# Altium footprint library AO4407A_C2841482.PcbLib: 1 footprints
Each footprint in its own frame and in the unit in brackets; x right, y up, seen from the top. Pads: shape width x height; smd on the part's side, far side on the other; paste and mask are expansions set on the pad; w line width, h text height; cw(c..) or ccw(c..) is an arc to the next point about the centre after c.
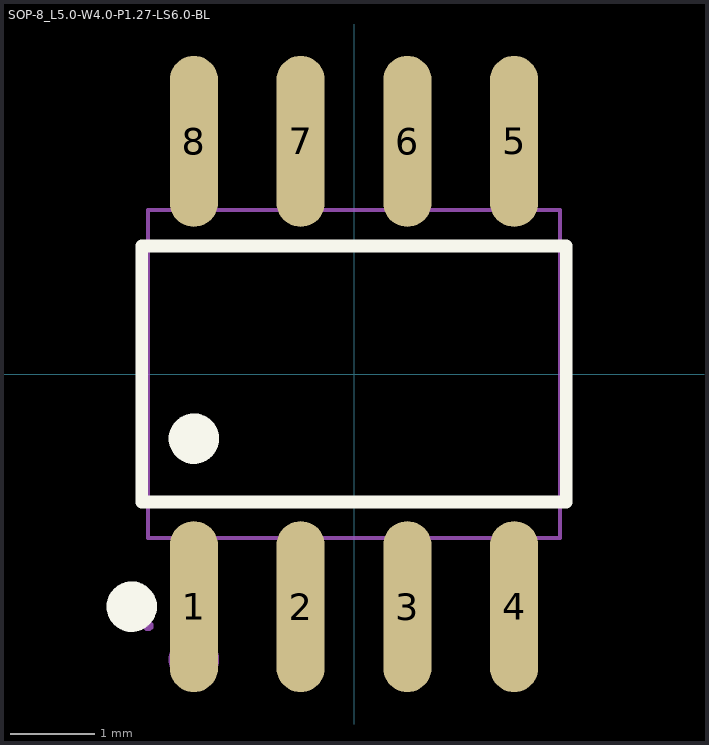
[diagram p0: the footprint, top view; thin cyan lines are the x and y axes]

## SOP-8_L5.0-W4.0-P1.27-LS6.0-BL [mil]
pads (8):
  oval 22.6x80.14 smd: 1(-75,-108.97) 2(-25,-108.97) 3(25,-108.97) 4(75,-108.97) 5(75,108.97) 6(25,108.97) 7(-25,108.97) 8(-75,108.97)
Top Overlay:
  circle w11.81: c-104.11,-108.97 r5.91
  circle w11.81: c-75,-30.28 r5.91
  lines w6: -99.46,-59.9 99.46,-59.9 99.46,59.9 -99.46,59.9 -99.46,-59.9
Mechanical 2:
  circle w11.81: c-75,-133.76 r5.91
Mechanical 6:
  lines w2: -96.46,-76.77 96.46,-76.77 96.46,76.77 -96.46,76.77 -96.46,-76.77
Mechanical 7:
  region: 66.93,85.53 66.93,76.38 83.07,76.38 83.07,85.53
  region: 16.93,85.53 16.93,76.38 33.07,76.38 33.07,85.53
  region: -33.07,85.53 -33.07,76.38 -16.93,76.38 -16.93,85.53
  region: -83.07,85.53 -83.07,76.38 -66.93,76.38 -66.93,85.53
  region: 66.93,-85.53 66.93,-76.38 83.07,-76.38 83.07,-85.53
  region: 16.93,-85.53 16.93,-76.38 33.07,-76.38 33.07,-85.53
  region: -33.07,-85.53 -33.07,-76.38 -16.93,-76.38 -16.93,-85.53
  region: -83.07,-85.53 -83.07,-76.38 -66.93,-76.38 -66.93,-85.53
Mechanical 8:
  region: -94.1,-118.01 -94.1,-118.99 -95.48,-120.37 -97.44,-120.37 -98.82,-118.99 -98.82,-118.01 -98.82,-117.03 -97.44,-115.65 -95.48,-115.65 -94.1,-117.03 -94.1,-118.01
Mechanical 9:
  region: 66.93,118.01 66.93,85.14 83.07,85.14 83.07,118.01
  region: 16.93,118.01 16.93,85.14 33.07,85.14 33.07,118.01
  region: -33.07,118.01 -33.07,85.14 -16.93,85.14 -16.93,118.01
  region: -83.07,118.01 -83.07,85.14 -66.93,85.14 -66.93,118.01
  region: 66.93,-118.01 66.93,-85.14 83.07,-85.14 83.07,-118.01
  region: 16.93,-118.01 16.93,-85.14 33.07,-85.14 33.07,-118.01
  region: -33.07,-118.01 -33.07,-85.14 -16.93,-85.14 -16.93,-118.01
  region: -83.07,-118.01 -83.07,-85.14 -66.93,-85.14 -66.93,-118.01